# Altium schematic symbol library 73096-2.SchLib: 1 symbol
Pins are listed as number, name and electrical type; pins without a type are passive.

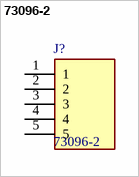
[diagram p0: symbol 73096-2]

## 73096-2
designator J?
Test Plugs & Test Jacks INLINE 4mm SAFETY JACK PBC MOUNT RED; Manufacturer_Name: Pomona Electronics; Geometry.Height: 27.76mm; Mouser Part Number: 565-73096-2; Mouser Price/Stock: https://www.mouser.co.uk/ProductDetail/Pomona-Electronics/73096-2?qs=B6kkDfuK7%2FCLJqVAgh%2FPjQ%3D%3D; Manufacturer_Part_Number: 73096-2; Datasheet Link: http://assets.edgenet.com/44f40043-51c7-4f8b-b242-62acf84469a2
footprint 730962
pins: 1 (power), 2 (power), 3 (power), 4 (power), 5 (power)